# EAGLE library part CD4021BM96 (library CD4021BM96)
CMOS 8-Stage Static Shift Register Source: Datasheet <http://www.ti.com/lit/gpn/CD4021B>
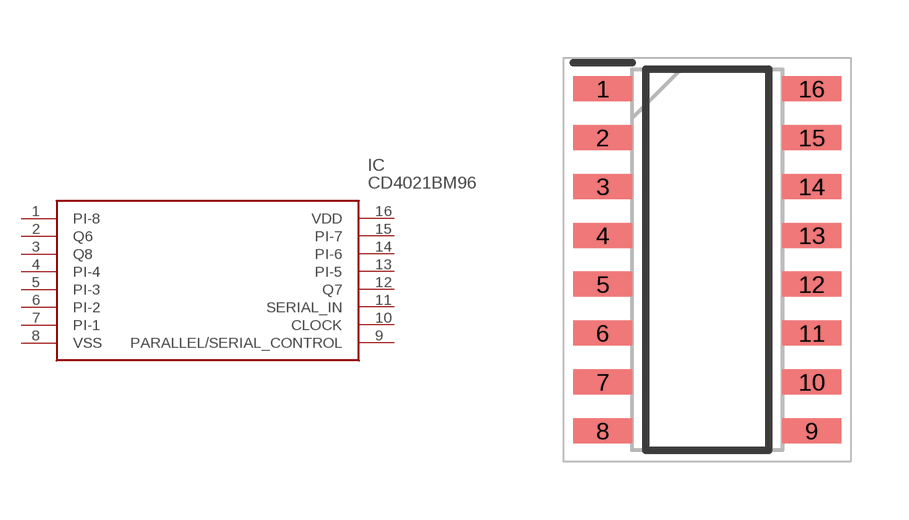
[diagram p0: symbol with the pads of SOIC127P600X175-16N; footprint SOIC127P600X175-16N]

Designator prefix IC

## CD4021BM96 (Description: CMOS 8-Stage Static Shift Register; Height: 1.75mm; Manufacturer_Name: Texas Instruments; Manufacturer_Part_Number: CD4021BM96; Mouser_Part_Number: 595-CD4021BM96; Mouser_Price-Stock: https://www.mouser.co.uk/ProductDetail/Texas-Instruments/CD4021BM96?qs=vmM6vcLFxxF7B4lvHkHOug%3D%3D)  [SOIC127P600X175-16N]
1  PI-8
2  Q6
3  Q8
4  PI-4
5  PI-3
6  PI-2
7  PI-1
8  VSS
9  PARALLEL/SERIAL_CONTROL
10  CLOCK
11  SERIAL_IN
12  Q7
13  PI-5
14  PI-6
15  PI-7
16  VDD

## Footprint SOIC127P600X175-16N (pad centres in mm)
D (R-PDSO-G16)
smd 1.525 x 0.65: 1 -2.712,4.445; 2 -2.712,3.175; 3 -2.712,1.905; 4 -2.712,0.635; 5 -2.712,-0.635; 6 -2.712,-1.905; 7 -2.712,-3.175; 8 -2.712,-4.445; 9 2.712,-4.445; 10 2.712,-3.175; 11 2.712,-1.905; 12 2.712,-0.635; 13 2.712,0.635; 14 2.712,1.905; 15 2.712,3.175; 16 2.712,4.445